# Altium footprint library FootPrintLib_8.PcbLib: 590 footprints (part 8 of 37)
Each footprint in its own frame and in the unit in brackets; x right, y up, seen from the top. Pads: shape width x height; smd on the part's side, far side on the other; paste and mask are expansions set on the pad; w line width, h text height; cw(c..) or ccw(c..) is an arc to the next point about the centre after c.
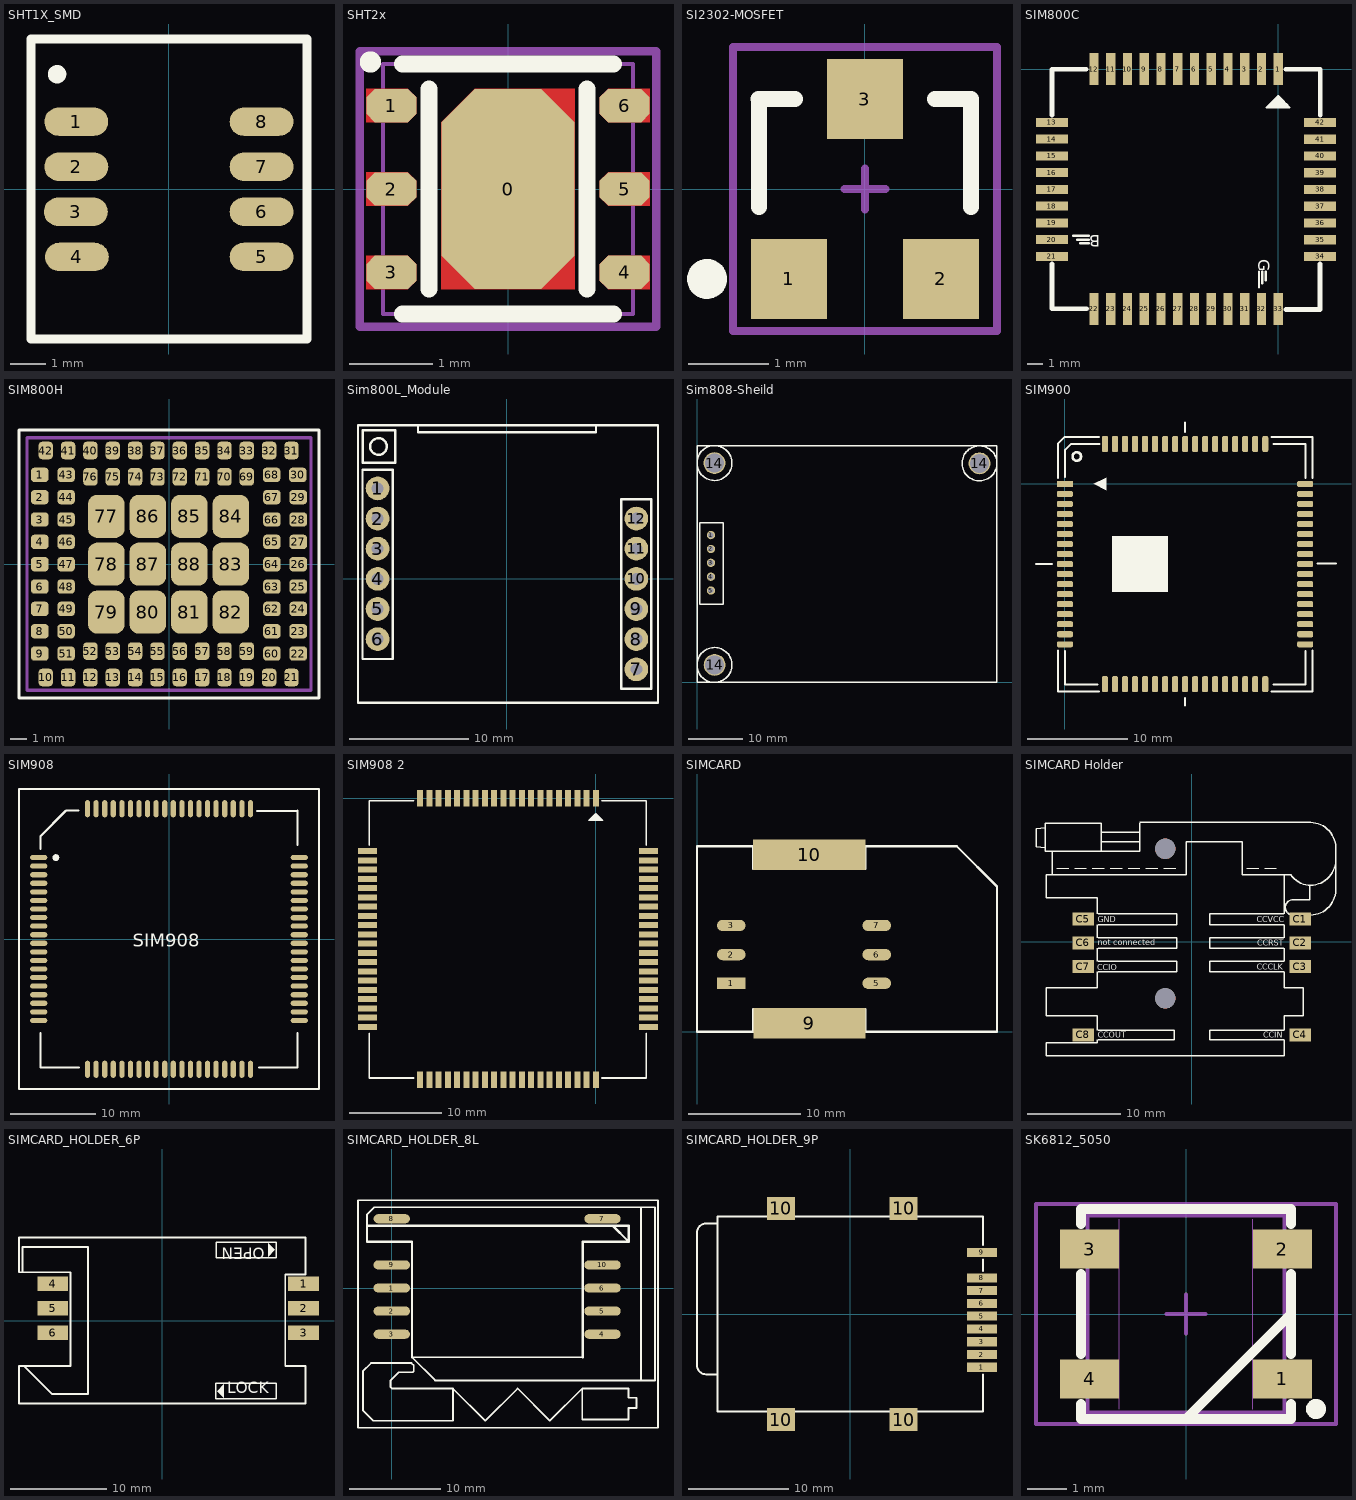
[diagram p7: the footprints below, top view; thin cyan lines are the x and y axes]

## SHT1X_SMD [mm]
pads (8):
  oval 1.8x0.8 smd: 1(-2.603,1.905) 2(-2.602,0.635) 3(-2.616,-0.635) 4(-2.587,-1.905) 5(2.616,-1.905) 6(2.616,-0.635) 7(2.616,0.635) 8(2.616,1.905)
Top Overlay:
  circle w0.254: c-3.142,3.24 r0.131
  lines w0.254: -3.877,-4.216 -3.877,4.232 3.894,4.232 3.894,-4.216 -3.877,-4.216
3D body "SHT_11_SMD.SLDPRT": height 2.4, standoff -0.1, extent -2.464,-3.727 2.536,3.773

## SHT2x [mm] "SHT2x, The outer dotted line represents the  outer dime  nsion of the DFN package"
height 1.1
pads (7):
  oct 1.6x2.4 smd paste-1 mask-1: 0(0,0)
  oct 0.6x0.4 smd paste+0 mask+0.102: 1(-1.4,1) 2(-1.4,0) 3(-1.4,-1) 4(1.4,-1) 5(1.4,0) 6(1.4,1)
Top Layer:
  region: -1.7,1.2 -1.2,1.2 -1.1,1.1 -1.1,0.9 -1.2,0.8 -1.7,0.8
  region: -1.7,0.2 -1.2,0.2 -1.1,0.1 -1.1,-0.1 -1.2,-0.2 -1.7,-0.2
  region: -1.7,-0.8 -1.2,-0.8 -1.1,-0.9 -1.1,-1.1 -1.2,-1.2 -1.7,-1.2
  region: 1.7,-0.2 1.2,-0.2 1.1,-0.1 1.1,0.1 1.2,0.2 1.7,0.2
  region: 1.7,-1.2 1.2,-1.2 1.1,-1.1 1.1,-0.9 1.2,-0.8 1.7,-0.8
  region: 1.7,0.8 1.2,0.8 1.1,0.9 1.1,1.1 1.2,1.2 1.7,1.2
  region: -0.8,0.8 -0.4,1.2 0.8,1.2 0.8,-1.2 -0.8,-1.2
Top Overlay:
  circle w0.152: c-1.651,1.524 r0.051
  lines w0.2: -1.27,-1.5 1.27,-1.5 ; -1.27,1.5 1.27,1.5
  lines w0.203: -0.95,-1.2 -0.95,1.2 ; 0.95,-1.2 0.95,1.2
Top Paste:
  region: 0.8,-1.2 0.4,-1.2 0.4,-1 0.8,-1
  region: 0.2,-1.2 -0.2,-1.2 -0.2,-1 0.2,-1
  region: -0.4,-1.2 -0.8,-1.2 -0.8,-1 -0.4,-1
  region: 0.8,-0.8 0.4,-0.8 0.4,-0.4 0.8,-0.4
  region: 0.2,-0.8 -0.2,-0.8 -0.2,-0.4 0.2,-0.4
  region: -0.4,-0.8 -0.8,-0.8 -0.8,-0.4 -0.4,-0.4
  region: -0.4,-0.2 -0.8,-0.2 -0.8,0.2 -0.4,0.2
  region: 0.2,-0.2 -0.2,-0.2 -0.2,0.2 0.2,0.2
  region: 0.8,-0.2 0.4,-0.2 0.4,0.2 0.8,0.2
  region: 1.7,0.8 1.2,0.8 1.1,0.9 1.1,1.1 1.2,1.2 1.7,1.2
  region: 1.7,-0.2 1.2,-0.2 1.1,-0.1 1.1,0.1 1.2,0.2 1.7,0.2
  region: -1.7,0.2 -1.2,0.2 -1.1,0.1 -1.1,-0.1 -1.2,-0.2 -1.7,-0.2
  region: -1.7,-0.8 -1.2,-0.8 -1.1,-0.9 -1.1,-1.1 -1.2,-1.2 -1.7,-1.2
  region: 1.7,-1.2 1.2,-1.2 1.1,-1.1 1.1,-0.9 1.2,-0.8 1.7,-0.8
  region: -1.7,1.2 -1.2,1.2 -1.1,1.1 -1.1,0.9 -1.2,0.8 -1.7,0.8
  region: 0.8,0.4 0.4,0.4 0.4,0.8 0.8,0.8
  region: 0.2,0.4 -0.2,0.4 -0.2,0.8 0.2,0.8
  region: -0.4,0.4 -0.8,0.4 -0.8,0.8 -0.4,0.8
  region: 0.8,1 0.4,1 0.4,1.2 0.8,1.2
  region: 0.2,1 -0.2,1 -0.2,1.2 0.2,1.2
  region: -0.4,1 -0.6,1 -0.4,1.2
Top Solder:
  region: -1.8,1.3 -1.15,1.3 -1,1.15 -1,0.85 -1.15,0.7 -1.8,0.7
  region: -1.8,0.3 -1.15,0.3 -1,0.15 -1,-0.15 -1.15,-0.3 -1.8,-0.3
  region: -1.8,-0.7 -1.15,-0.7 -1,-0.85 -1,-1.15 -1.15,-1.3 -1.8,-1.3
  region: 1.8,-1.3 1.15,-1.3 1,-1.15 1,-0.85 1.15,-0.7 1.8,-0.7
  region: 1.8,-0.3 1.15,-0.3 1,-0.15 1,0.15 1.15,0.3 1.8,0.3
  region: 1.8,0.7 1.15,0.7 1,0.85 1,1.15 1.15,1.3 1.8,1.3
  region: -0.9,0.85 -0.45,1.3 0.9,1.3 0.9,-1.3 -0.9,-1.3
Mechanical 13:
  lines w0.051: -1.5,-1.5 1.5,-1.5 1.5,1.5 -1.5,1.5 -1.5,-1.5
Mechanical 15:
  lines w0.1: -0.254,0 0.254,0 ; 0,-0.254 0,0.254 ; -1.778,-1.651 -1.778,1.651 1.778,1.651 1.778,-1.651 -1.778,-1.651
3D body "User Library-Sensor_SHT21.step": height 1.1, standoff -0.02, extent -1.499,-1.5 1.521,1.5

## SI2302-MOSFET [mm] "SI2302-MOSFET"
height 0.9
pads (3):
  rect 0.95x1 smd: 1(-0.95,-1.125) 2(0.95,-1.125) 3(0,1.125)
Top Overlay:
  circle w0.25: c-1.975,-1.125 r0.125
  lines w0.2: -1.328,1.125 -0.875,1.125 ; -1.325,-0.225 -1.325,1.125 ; 0.875,1.125 1.325,1.125 1.325,-0.225
Mechanical 15:
  lines w0.1: -0.254,0 0.254,0 ; 0,-0.254 0,0.254 ; -1.651,-1.778 1.651,-1.778 1.651,1.778 -1.651,1.778 -1.651,-1.778
3D body "User Library-SOT23-3.step": height 1.3, standoff 0, extent -1.448,-1.397 1.452,1.403

## SIM800C [mm]
pads (42):
  rect 0.6x2.1 smd: 1(0,0) 2(-1.1,0) 3(-2.2,0) 4(-3.3,0) 5(-4.4,0) 6(-5.5,0) 7(-6.6,0) 8(-7.7,0) 9(-8.8,0) 10(-9.9,0) 11(-11,0) 12(-12.1,0) 22(-12.1,-15.74) 23(-11,-15.74) 24(-9.9,-15.74) 25(-8.8,-15.74) 26(-7.7,-15.74) 27(-6.6,-15.74) 28(-5.5,-15.74) 29(-4.4,-15.74) 30(-3.3,-15.74) 31(-2.2,-15.74) 32(-1.1,-15.74) 33(0,-15.74)
  rect 2.1x0.6 smd: 13(-14.859,-3.492) 14(-14.859,-4.592) 15(-14.859,-5.692) 16(-14.859,-6.792) 17(-14.859,-7.892) 18(-14.859,-8.992) 19(-14.859,-10.092) 20(-14.859,-11.192) 21(-14.859,-12.292) 34(2.743,-12.299) 35(2.743,-11.199) 36(2.743,-10.099) 37(2.743,-8.999) 38(2.743,-7.899) 39(2.743,-6.799) 40(2.743,-5.699) 41(2.743,-4.599) 42(2.743,-3.499)
Top Overlay:
  lines w0.127: -0.686,-2.438 0.686,-2.438 ; -0.61,-2.362 0.61,-2.362 ; -0.533,-2.286 0.533,-2.286 ; -0.457,-2.21 0.457,-2.21 ; -0.381,-2.134 0.381,-2.134 ; -0.305,-2.057 0.305,-2.057 ; -0.229,-1.981 0.229,-1.981 ; -0.152,-1.905 0.152,-1.905 ; -0.076,-1.829 0.076,-1.829 ; -0.762,-2.515 0,-1.753 0.737,-2.515 -0.762,-2.515
  lines w0.15: -13.462,-10.947 -12.446,-10.947 ; -13.208,-11.201 -12.446,-11.201 ; -13.005,-11.43 -12.446,-11.43 ; -1.27,-14.326 -1.27,-13.31 ; -1.041,-14.072 -1.041,-13.31 ; -0.813,-13.868 -0.813,-13.31
  lines w0.3: -14.859,-12.774 -14.859,-15.74 -13.919,-15.74 -12.573,-15.74 ; -14.859,-3.017 -14.859,-0.012 -12.598,-0.012 ; 0.483,-15.785 2.75,-15.785 ; 0.483,0 2.75,0 2.75,-2.65 2.75,-3.014 ; 2.743,-15.768 2.743,-13.118 2.743,-12.776
  text "B" at -11.684,-10.897 h0.76
  text "G" at -1.321,-12.471 h0.76
3D body "User Library-SIM800C-1.STEP": height 2.47, standoff 0.13, extent -14.858,-15.77 2.742,-0.07

## SIM800H [mm]
pads (88):
  rrect50% 1.1x0.9 smd: 1(-8.1,5.587) 2(-8.1,4.187) 3(-8.1,2.787) 4(-8.1,1.387) 5(-8.1,-0.013) 6(-8.1,-1.413) 7(-8.1,-2.813) 8(-8.1,-4.213) 9(-8.1,-5.613) 22(8.1,-5.613) 23(8.1,-4.212) 24(8.1,-2.812) 25(8.1,-1.412) 26(8.1,-0.012) 27(8.1,1.388) 28(8.1,2.788) 29(8.1,4.188) 30(8.075,5.587) 43(-6.45,5.587) 44(-6.45,4.187) 45(-6.45,2.787) 46(-6.45,1.387) 47(-6.45,-0.013) 48(-6.45,-1.413) 49(-6.45,-2.813) 50(-6.45,-4.213) 51(-6.45,-5.613) 60(6.45,-5.613) 61(6.45,-4.213) 62(6.45,-2.813) 63(6.45,-1.413) 64(6.45,-0.013) 65(6.45,1.387) 66(6.45,2.787) 67(6.45,4.187) 68(6.425,5.587)
  rrect50% 0.9x1.1 smd: 10(-7.725,-7.113) 11(-6.325,-7.113) 12(-4.925,-7.113) 13(-3.525,-7.113) 14(-2.125,-7.113) 15(-0.725,-7.113) 16(0.675,-7.113) 17(2.075,-7.113) 18(3.475,-7.113) 19(4.875,-7.113) 20(6.275,-7.113) 21(7.675,-7.113) 31(7.675,7.113) 32(6.275,7.113) 33(4.875,7.113) 34(3.475,7.113) 35(2.075,7.113) 36(0.675,7.113) 37(-0.725,7.113) 38(-2.125,7.113) 39(-3.525,7.113) 40(-4.925,7.113) 41(-6.325,7.113) 42(-7.725,7.113) 52(-4.925,-5.463) 53(-3.525,-5.463) 54(-2.125,-5.463) 55(-0.725,-5.463) 56(0.675,-5.463) 57(2.075,-5.463) 58(3.475,-5.463) 59(4.875,-5.463) 69(4.875,5.463) 70(3.475,5.463) 71(2.075,5.463) 72(0.675,5.463) 73(-0.725,5.463) 74(-2.125,5.463) 75(-3.525,5.463) 76(-4.925,5.463)
  rrect50% 2.3x2.7 smd: 77(-3.925,2.987) 78(-3.925,-0.013) 79(-3.925,-3.013) 80(-1.325,-3.013) 81(1.275,-3.013) 82(3.875,-3.013) 83(3.875,-0.013) 84(3.875,2.987) 85(1.275,2.987) 86(-1.325,2.987) 87(-1.325,-0.013) 88(1.275,-0.013)
Top Overlay:
  lines w0.2: -9.4,-8.4 9.4,-8.4 9.4,8.4 -9.4,8.4 -9.4,-8.4
Mechanical 1:
  lines w0.2: -8.9,-7.912 -8.9,7.913 8.9,7.913 8.9,-7.912 -8.9,-7.912
3D body "User Library-SIM800H.STEP": height 2.42, standoff 0, extent -8.9,-7.9 8.9,7.9

## Sim800L_Module [mm] "GSM/GPRS Module 25x23/6mm"
height 6
pads (12):
  round 2 hole 1: 1(-10.9,7.62) 2(-10.9,5.08) 3(-10.9,2.54) 4(-10.9,0) 5(-10.9,-2.54) 6(-10.9,-5.08) 7(10.9,-7.62) 8(10.9,-5.08) 9(10.9,-2.54) 10(10.9,0) 11(10.9,2.54) 12(10.9,5.08)
Top Overlay:
  circle w0.2: c-10.825,11.15 r0.7
  lines w0.2: -7.5,12.95 -7.5,12.35 7.5,12.35 7.5,12.95 ; -12.55,-10.45 12.725,-10.45 12.725,12.95 -12.55,12.95 -12.55,-10.45 ; -12.17,-6.75 -12.17,9.2 -9.63,9.2 -9.63,-6.75 -12.17,-6.75 ; -12.15,9.775 -12.15,12.525 -9.4,12.525 -9.4,9.775 -12.15,9.775 ; 9.63,-9.25 12.17,-9.25 12.17,6.7 9.63,6.7 9.63,-9.25
3D body "Module Sim800L_V1.step": height 15.49, standoff -2.37, extent -12.55,-10.45 12.725,12.95

## Sim808-Sheild [mm] "sim808 module shield"
height 10
pads (8):
  round 1.524 hole 1: 1(2.551,27.003) 2(2.551,24.463) 3(2.551,21.923) 4(2.551,19.383) 5(2.551,16.843)
  round 4 hole 3.5: 14(3.2,40.208) 14(3.225,3.2) 14(51.791,40.157)
Top Overlay:
  circle w0.254: c3.2,3.2 r3.2
  circle w0.254: c3.2,40.208 r3.2
  circle w0.254: c51.791,40.157 r3.2
  lines w0.254: 0,43.4 0,0 55,0 55,43.4 ; 0,43.403 55,43.403 ; 0.525,14.329 4.811,14.329 4.811,29.303 0.525,29.303 0.525,14.329

## SIM900 [mm] "SIM900/SIM900A PCB Footprint"
height 2
pads (68):
  rect 1.6x0.6 smd: 1(0,0)
  rrect50% 1.6x0.6 smd: 2(0,-1) 3(0,-2) 4(0,-3) 5(0,-4) 6(0,-5) 7(0,-6) 8(0,-7) 9(0,-8) 10(0,-9) 11(0,-10) 12(0,-11) 13(0,-12) 14(0,-13) 15(0,-14) 16(0,-15) 17(0,-16) 35(23.989,-16) 36(23.989,-15) 37(23.989,-14) 38(23.989,-13) 39(23.989,-12) 40(23.989,-11) 41(23.989,-10) 42(23.989,-9) 43(23.989,-8) 44(23.989,-7) 45(23.989,-6) 46(23.989,-5) 47(23.989,-4) 48(23.989,-3) 49(23.989,-2) 50(23.989,-1) 51(23.989,0)
  rrect50% 0.6x1.6 smd: 18(4,-19.989) 19(5,-19.989) 20(6,-19.989) 21(7,-19.989) 22(8,-19.989) 23(9,-19.989) 24(10,-19.989) 25(11,-19.989) 26(12,-19.989) 27(13,-19.989) 28(14,-19.989) 29(15,-19.989) 30(16,-19.989) 31(17,-19.989) 32(18,-19.989) 33(19,-19.989) 34(20,-19.989) 52(20,3.989) 53(19,3.989) 54(18,3.989) 55(17,3.989) 56(16,3.989) 57(15,3.989) 58(14,3.989) 59(13,3.989) 60(12,3.989) 61(11,3.989) 62(10,3.989) 63(9,3.989) 64(8,3.989) 65(7,3.989) 66(6,3.989) 67(5,3.989) 68(4,3.989)
Top Overlay:
  circle w0.254: c1.186,2.744 r0.426
  rectangle: 4.7,-10.8 10.3,-5.2
  region: 2.881,0.001 4.151,-0.634 4.151,0.636
  lines w0.2: -0.7,-16.6 -0.7,-20.7 3.4,-20.7 ; -0.7,0.6 -0.7,4 0,4.7 3.4,4.7 ; 0,-16.687 0,-20 3.237,-20 ; 0,0.712 0,3.354 0.646,4 3.44,4 ; 20.6,-20.7 24.7,-20.7 24.7,-16.6 ; 20.6,4.7 24.7,4.7 24.7,0.6 ; 20.814,-20 24,-20 24,-16.661 ; 20.839,4 24,4 24,0.611
  lines w0.203: -2.884,-8 -1.31,-8 ; 12,-22.098 12,-21.386 ; 12,5.208 12,6.122 ; 25.208,-7.949 27.062,-7.949
Bottom Overlay:
  circle w0.508: c11.506,0 r1.524
3D body "User Library-SIM900.step": height 3.02, standoff 0, extent 0.014,-19.976 24.014,4.024

## SIM908 [mm]
pads (81):
  oval 2x0.6 smd: 1(-15.2,9.5) 2(-15.2,8.5) 3(-15.2,7.5) 4(-15.2,6.5) 5(-15.2,5.5) 6(-15.2,4.5) 7(-15.2,3.5) 8(-15.2,2.5) 9(-15.2,1.5) 10(-15.2,0.5) 11(-15.2,-0.5) 12(-15.2,-1.5) 13(-15.2,-2.5) 14(-15.2,-3.5) 15(-15.2,-4.5) 16(-15.2,-5.5) 17(-15.2,-6.5) 18(-15.2,-7.5) 19(-15.2,-8.5) 20(-15.2,-9.5) 41(15.2,-9.5) 42(15.2,-8.5) 43(15.2,-7.5) 44(15.2,-6.5) 45(15.2,-5.5) 46(15.2,-4.5) 47(15.2,-3.5) 48(15.2,-2.5) 49(15.2,-1.5) 50(15.2,-0.5) 51(15.2,0.5) 52(15.2,1.5) 53(15.2,2.475) 54(15.2,3.5) 55(15.2,4.5) 56(15.2,5.5) 57(15.2,6.5) 58(15.2,7.5) 59(15.2,8.5) 60(15.2,9.5)
  oval 0.6x2 smd: 21(-9.5,-15.2) 22(-8.5,-15.2) 23(-7.5,-15.2) 24(-6.5,-15.2) 25(-5.5,-15.2) 26(-4.5,-15.2) 27(-3.5,-15.2) 28(-2.5,-15.2) 29(-1.5,-15.2) 30(-0.5,-15.2) 31(0.5,-15.2) 32(1.5,-15.2) 33(2.5,-15.2) 34(3.5,-15.2) 35(4.5,-15.2) 36(5.5,-15.2) 37(6.5,-15.2) 38(7.5,-15.2) 39(8.5,-15.2) 40(9.5,-15.2) 61(9.5,15.2) 62(8.5,15.2) 63(7.5,15.2) 64(6.5,15.2) 65(5.5,15.2) 66(4.5,15.2) 67(3.5,15.2) 68(2.5,15.2) 69(1.5,15.2) 70(0.5,15.2) 71(-0.5,15.2) 72(-1.5,15.2) 73(-2.5,15.2) 74(-3.5,15.2) 75(-4.5,15.2) 76(-5.5,15.2) 77(-6.5,15.2) 78(-7.5,15.2) 79(-8.5,15.2) 80(-9.5,15.2)
  round 0.8 on Top Overlay: ""(-13.193,9.5)
Top Overlay:
  lines w0.254: -15,-11 -15,-15 -10.5,-15 ; -15,10.5 -15,12 -12.076,14.924 -12,14.924 -12,15 -10.576,15 ; 10.298,14.924 14.924,14.924 ; 10.5,-15 15,-15 15,-11 ; 14.924,17.5 17.5,17.5 17.5,-17.5 -17.5,-17.5 -17.5,17.5 15,17.5 ; 15,11 15,15
  text "SIM908" at -4.216,-0.889 h1.52
3D body "User Library-SIM908.STEP": height 3.09, standoff -0.11, extent -14.968,-15.042 15.032,14.958

## SIM908 2 [mil]
pads (80):
  rect 25x70 smd: 1(0,0) 2(-39.37,0) 3(-78.74,0) 4(-118.11,0) 5(-157.48,0) 6(-196.85,0) 7(-236.22,0) 8(-275.59,0) 9(-314.96,0) 10(-354.33,0) 11(-393.7,0) 12(-433.07,0) 13(-472.44,0) 14(-511.81,0) 15(-551.18,0) 16(-590.55,0) 17(-629.92,0) 18(-669.29,0) 19(-708.66,0) 20(-748.03,0) 41(-748.03,-1196.85) 42(-708.66,-1196.85) 43(-669.29,-1196.85) 44(-629.92,-1196.85) 45(-590.55,-1196.85) 46(-551.18,-1196.85) 47(-511.81,-1196.85) 48(-472.44,-1196.85) 49(-433.07,-1196.85) 50(-393.7,-1196.85) 51(-354.33,-1196.85) 52(-314.96,-1196.85) 53(-276,-1197) 54(-236.22,-1196.85) 55(-196.85,-1196.85) 56(-157.48,-1196.85) 57(-118.11,-1196.85) 58(-78.74,-1196.85) 59(-39.37,-1196.85) 60(0,-1196.85)
  rect 80x25 smd: 21(-972.44,-224.41) 22(-972.44,-263.78) 23(-972.44,-303.15) 24(-972.44,-342.52) 25(-972.44,-381.89) 26(-972.44,-421.26) 27(-972.44,-460.63) 28(-972.44,-500) 29(-972.44,-539.37) 30(-972.44,-578.74) 31(-972.44,-618.11) 32(-972.44,-657.48) 33(-972.44,-696.85) 34(-972.44,-736.22) 35(-972.44,-775.59) 36(-972.44,-814.96) 37(-972.44,-854.33) 38(-972.44,-893.7) 39(-972.44,-933.07) 40(-972.44,-972.44) 61(224.41,-972.44) 62(224.41,-933.07) 63(224.41,-893.7) 64(224.41,-854.33) 65(224.41,-814.96) 66(224.41,-775.59) 67(224.41,-736.22) 68(224.41,-696.85) 69(224.41,-657.48) 70(224.41,-618.11) 71(224.41,-578.74) 72(224.41,-539.37) 73(224.41,-500) 74(224.41,-460.63) 75(224.41,-421.26) 76(224.41,-381.89) 77(224.41,-342.52) 78(224.41,-303.15) 79(224.41,-263.78) 80(224.41,-224.41)
Top Overlay:
  lines w5: -27,-91 27,-91 ; -24,-88 24,-88 ; -21,-85 21,-85 ; -18,-82 18,-82 ; -15,-79 15,-79 ; -12,-76 12,-76 ; -9,-73 9,-73 ; -6,-70 6,-70 ; -3,-67 3,-67 ; -30,-94 0,-64 29,-94 -30,-94
  lines w7: -965,-1000 -965,-1190 -775,-1190 ; -965,-200 -965,-10 -775,-10 ; 25,-1190 215,-1190 215,-1000 ; 25,-10 215,-10 215,-200
3D body "SIM908.STEP": height 130.19, standoff 4.2, extent -965.56,-1190 215.56,-8.89

## SIMCARD [mm]
pads (8):
  rect 2.54x1 smd: 1(3.048,4.3)
  oval 2.54x1 smd: 2(3.048,6.85) 3(3.048,9.45) 5(16.002,4.3) 6(16.002,6.85) 7(16.002,9.45)
  rect 10x2.7 smd: 9(10.008,0.737) 10(9.982,15.748)
Top Overlay:
  lines w0.203: 5,0 5,2 15,2 15,0 ; 5,16.5 5,14.5 15,14.5 15,16.5 ; 0,0 26.7,0 26.7,12.925 23.125,16.5 0,16.5 0,0
3D body "SimCard_mtn irancel.STEP": height 2.36, standoff 1.56, extent 0.508,0.635 25.654,15.875
3D body "sim soket.STEP": height 3, standoff 0, extent -0.714,0.055 14.986,16.455

## SIMCARD Holder [mil]
height 40
pads (10):
  rect 90x55 smd: C1(457,96.07) C2(457,-3.93) C3(457,-103.93) C4(457,-391.93) C5(-457,96.07) C6(-457,-3.93) C7(-457,-103.93) C8(-457,-391.93)
  round 86 hole 86 unplated: ""(-111.27,-237.99) ""(-111.27,391.93)
Top Overlay:
  lines w2: -568,310.83 -518,310.83 ; -493,310.83 -443,310.83 ; -418,310.83 -368,310.83 ; -343,310.83 -293,310.83 ; -268,310.83 -218,310.83 ; -193,310.83 -143,310.83 ; -118,310.83 -68,310.83 ; 232,310.83 282,310.83 ; 307,310.83 357,310.83
  lines w6: -396.7,-411.93 -396.7,-425 -613.24,-425 -613.24,-479.06 390.7,-479.06 390.7,-411.93 ; -396.7,-371.93 -396.7,-312.21 -613.24,-312.21 -613.24,-194.1 -396.7,-194.1 -396.7,-126.93 ; -396.7,-81.93 -396.7,-26.93 ; -396.7,18.07 -396.7,73.07 ; -396.7,118.07 -396.7,185.24 -613.24,185.24 -613.24,283.66 -587.24,283.66 ; -393,-411.93 -73,-411.93 -73,-371.93 -393,-371.93 ; -393,-126.93 -63,-126.93 -63,-81.93 -393,-81.93 ; -393,-26.93 -63,-26.93 -63,18.07 -393,18.07 ; -393,73.07 -63,73.07 -63,118.07 -393,118.07 ; -219.54,500.2 -219.54,460.83 ; -218,503.07 502,503.07 cw(c499.5,395.57) 607,398.07 607,218.07 cw(c499.5,220.57) 502,113.07 427,113.07 cw(c427,145.57) 427,178.07 496.76,178.07 ; 387,-411.93 77,-411.93 77,-371.93 387,-371.93 ; 387,-126.93 77,-126.93 77,-81.93 387,-81.93 ; 387,-26.93 77,-26.93 77,18.07 387,18.07 ; 387,73.07 77,73.07 77,118.07 387,118.07 ; 390.7,-371.93 390.7,-312.21 469.44,-312.21 469.44,-194.1 390.7,-194.1 390.7,-126.93 ; 390.7,-81.93 390.7,-26.93 ; 390.7,18.07 390.7,73.07 ; 390.7,118.07 390.7,283.66 ; 417,283.07 ccw(c503.17,343.07) 502,238.07 ccw(c499.5,345.57) 607,343.07 ; 417,283.66 390.7,283.66 ; 496.76,238.07 496.76,178.07 ; 497,178.07 496.76,178.07 ; -616.35,396.46 -655.72,401.46 -655.72,475.83 -616.35,480.83 ; -616.35,396.46 -616.35,382.09 -587.24,382.09 ; -616.35,396.46 -616.35,480.83 ; -616.35,480.83 -616.35,500.2 -380.13,500.2 -380.13,460.83 ; -587.24,283.66 -22.69,283.66 -22.69,421.46 213.54,421.46 213.54,283.66 390.7,283.66 ; -587.24,283.66 -587.24,382.09 ; -587.24,382.09 -380.13,382.09 ; -380.13,382.09 -219.54,382.09 -219.54,421.46 ; -380.13,382.09 -380.13,421.46 ; -380.13,421.46 -219.54,421.46 ; -380.13,421.46 -380.13,460.83 ; -380.13,460.83 -219.54,460.83 ; -219.54,421.46 -219.54,460.83
  text "GND" at -396,83.07 h25
  text "not connected" at -396,-13.93 h25
  text "CCIO" at -397,-118.93 h25
  text "CCOUT" at -396,-404.93 h25
  text "CCIN" at 302,-404.93 h25
  text "CCCLK" at 274,-117.93 h25
  text "CCRST" at 276,-16.93 h25
  text "CCVCC" at 274,83.07 h25

## SIMCARD_HOLDER_6P [mm] "SimCard Connector, 6Pin ,Body 29.7 x 17.2 mm"
height 2.5
pads (6):
  rect 3.2x1.5 smd: 1(14.65,3.81) 2(14.65,1.27) 3(14.65,-1.27) 4(-11.35,3.81) 5(-11.35,1.27) 6(-11.35,-1.27)
Top Overlay:
  region: 11,6.625 11.687,7.312 11,8
  region: 6.375,-6.625 5.688,-7.312 6.375,-8
  lines w0.15: 5.55,-8.125 11.8,-8.125 11.8,-6.5 5.55,-6.5 5.55,-8.125 ; 5.575,6.5 5.575,8.125 11.825,8.125 11.825,6.5 5.575,6.5
  lines w0.2: -14.5,5 -14.5,7.625 -7.675,7.625 -7.675,-7.625 -9.95,-7.625 -11.425,-7.625 -14.35,-4.7 ; -14.85,-8.6 -14.85,-4.7 -9.525,-4.7 -9.525,5 -14.85,5 -14.85,8.6 14.85,8.6 14.85,4.75 12.75,4.75 12.75,-4.725 14.85,-4.725 14.85,-8.6 -14.85,-8.6
  text "OPEN" at 10.625,7.95 h2
  text "LOCK" at 6.75,-7.95 h2
3D body "SIM5060-6-0-26-00-A_revC2.STEP": height 2.7, standoff 0.1, extent -14.85,-8.6 14.8,8.6

## SIMCARD_HOLDER_8L [mm] "Simcard holder"
pads (10):
  oval 4x1 smd: 1(0,0) 2(0,-2.54) 3(0,-5.08) 4(23.178,-5.08) 5(23.178,-2.54) 6(23.178,0) 7(23.178,7.62) 8(0,7.62) 9(0,2.54) 10(23.178,2.54)
Top Overlay:
  lines w0.2: -2.73,5.08 -2.73,6.858 -2.73,8.065 -1.905,8.89 27.432,8.89 ; 20.994,-7.62 2.223,-7.62 4.763,-10.16 27.686,-10.16 ; 29.21,-15.367 -3.683,-15.367 -3.714,-15.336 -3.714,9.621 -3.683,9.652 12.237,9.652 29.21,9.652 ; 29.286,-15.367 29.286,9.652 ; 6.731,-11.049 0,-11.049 -0.127,-10.922 -0.127,-10.16 0.762,-9.271 2.286,-9.271 2.413,-9.144 2.413,-8.509 2.159,-8.255 -2.286,-8.255 -3.175,-9.144 -3.175,-13.462 -2.032,-14.605 6.731,-14.605 6.731,-11.049 ; 6.731,-11.049 10.287,-14.605 13.843,-11.049 17.399,-14.605 20.955,-11.049 ; 20.955,-11.049 20.955,-14.478 26.035,-14.478 26.035,-13.208 26.924,-13.208 26.924,-12.065 26.035,-12.065 26.035,-11.049 20.955,-11.049 ; 27.432,8.89 27.432,-10.16 28.956,-10.16 28.956,8.89 27.432,8.89
  lines w0.254: -2.73,5.08 2.223,5.08 2.223,-7.62 ; -2.73,6.858 26.074,6.858 26.074,5.08 ; 20.994,-7.62 20.994,5.08 26.074,5.08 ; 24.276,6.877 26.074,5.08

## SIMCARD_HOLDER_9P [mm] "SimCard Connector, 9Pin ,Body 26.4 x 19.4 mm"
height 1.7
pads (13):
  rect 3x0.9 smd: 1(13.1,-5.3) 2(13.1,-4.03) 3(13.1,-2.76) 4(13.1,-1.49) 5(13.1,-0.22) 6(13.1,1.05) 7(13.1,2.32) 8(13.1,3.59) 9(13.1,6.13)
  rect 2.8x2.3 smd: 10(-6.9,-10.5) 10(-6.9,10.5) 10(5.3,-10.5) 10(5.3,10.5)
Top Overlay:
  lines w0.2: -13.2,-6 -14.354,-6 cw(c-14.354,-5.104) -15.25,-5.104 -15.25,8.104 cw(c-14.354,8.104) -14.354,9 -13.2,9 ; 13.2,-6.025 13.2,-9.7 -13.2,-9.7 -13.2,9.7 13.2,9.7 13.2,6.85 ; 13.2,4.275 13.2,5.4
3D body "Sim4065_Irancell.step": height 1.7, standoff 0.05, extent -15.25,-10.5 13.2,10.5

## SK6812_5050 [mm] "SMT LED"
height 1.3
pads (4):
  rect 1.5x1 smd: 1(2.45,-1.65) 2(2.45,1.65) 3(-2.45,1.65) 4(-2.45,-1.65)
Top Overlay:
  circle w0.254: c3.302,-2.413 r0.127
  lines w0.254: -2.667,-2.286 -2.667,-2.667 2.667,-2.667 2.667,-2.286 ; -2.667,-1.016 -2.667,1.016 ; -2.667,2.286 -2.667,2.667 2.667,2.667 2.667,2.286 ; 0,-2.667 2.667,0 ; 2.667,-1.016 2.667,1.016
Mechanical 13:
  lines w0.02: -1.7,-2.413 -1.7,2.413 ; 1.7,-2.413 1.7,2.413
  lines w0.1: -2.5,-2.5 2.5,-2.5 2.5,2.5 -2.5,2.5 -2.5,-2.5
Mechanical 15:
  lines w0.1: -0.5,0 0.5,0 ; 0,-0.5 0,0.5 ; -3.81,-2.794 3.81,-2.794 3.81,2.794 -3.81,2.794 -3.81,-2.794
3D body "User Library-WS2812B.step": height 1.7, standoff 0, extent -2.733,-2.54 2.667,2.46